# Altium schematic symbol library MISKO.SchLib: 32 symbols
Pins are listed as number, name and electrical type; pins without a type are passive.

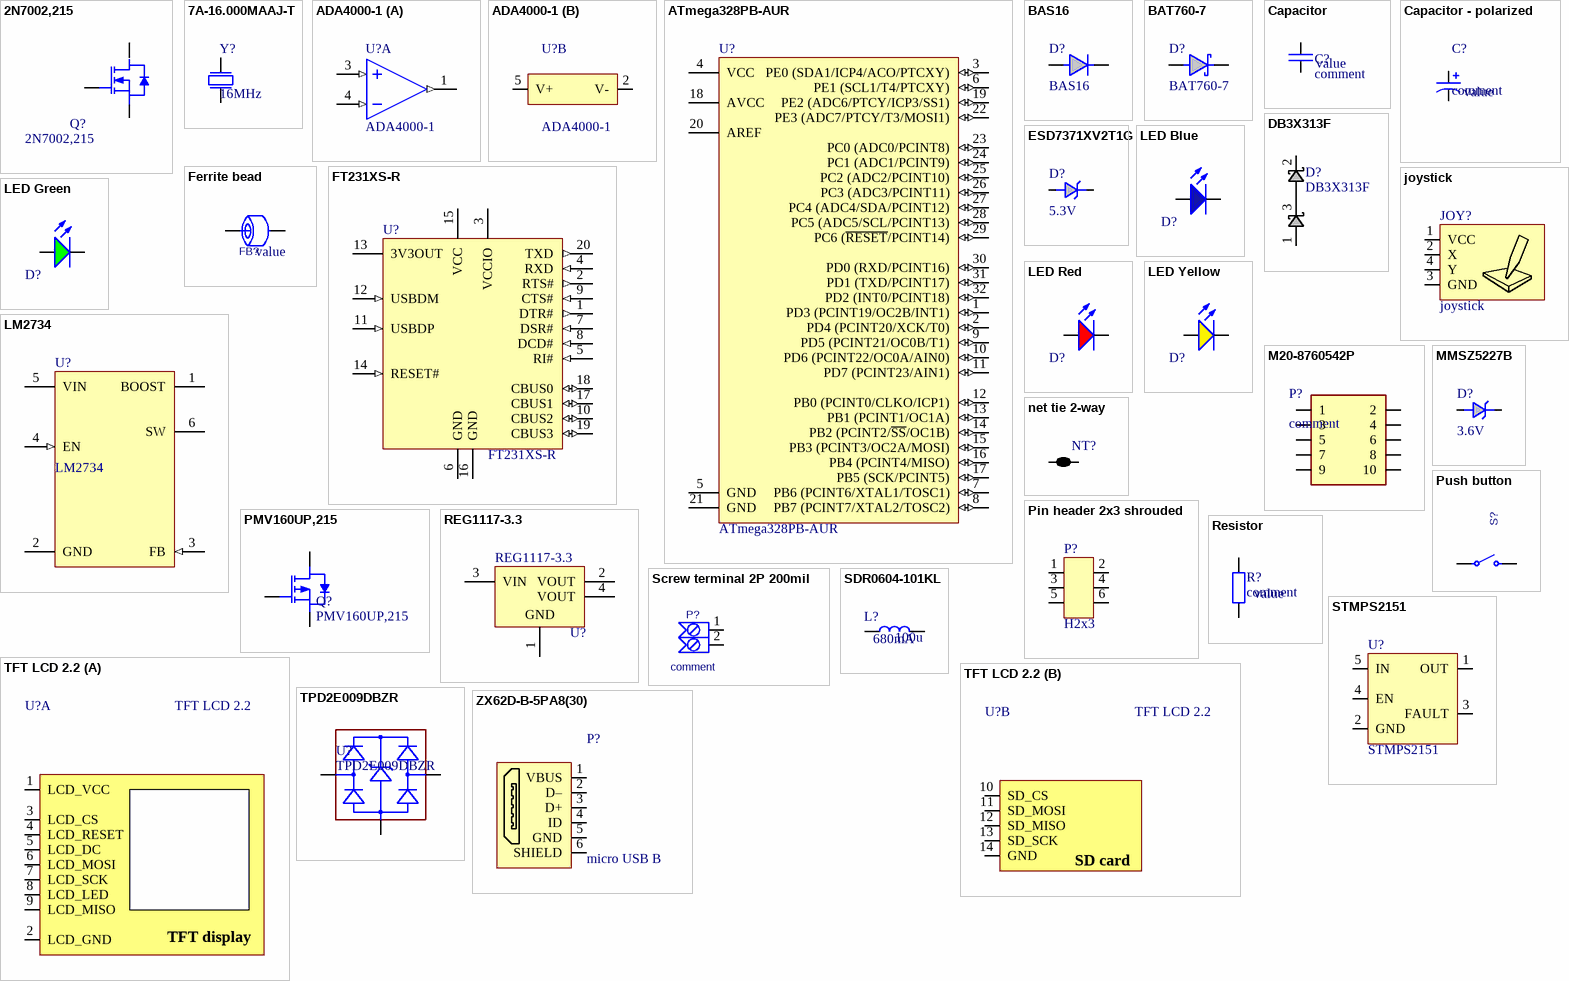
[diagram p0: symbols 2N7002,215 to ZX62D-B-5PA8(30)]

## 2N7002,215
designator Q?
N-Channel Trench MOSFET, 60 V, 0.3 A, 3-Pin SOT23, Tape and Reel; Manufacturer: NXP Semiconductors; Channel Type: N; Ciss [typ] (pF): 31; Coss [typ] (pF): 6.8; ID [max] (A): 0.3; Packing: Tape & Reel; Qr [typ] (nC): 30; VDS [max] (V): 60; VGSth [typ] (V): 2; DatasheetVersion: Rev. 7; PackageVersion: 06-03-16, 03/2006; PackageReference: SOT23; PackageDescription: 3-Pin Small Outline Transistor Package, Body 2.9 x 1.3 mm, Pitch 0.95 mm; Supplier 1: Digi-Key; Supplier Part Number 1: 568-1369-2-ND; Supplier 2: Digi-Key; Supplier Part Number 2: 568-1369-1-ND; Supplier 3: Digi-Key; Supplier Part Number 3: 568-1369-6-ND; Supplier 4: Farnell; Supplier Part Number 4: 2315576; Supplier 5: Farnell; Supplier Part Number 5: 1510761; Supplier 6: Farnell; Supplier Part Number 6: 1510761RL; Supplier 7: Newark; Supplier Part Number 7: 75R4879; Supplier 8: Newark; Supplier Part Number 8: 70R9742; Supplier 9: Mouser; Supplier Part Number 9: 771-2N7002-T/R; Mounting Technology: Surface Mount; Code_JEDEC: TO-236AB; PartNumber: 2N7002,215; ComponentLink1Description: Manufacturer URL; ComponentLink1URL: http://www.nxp.com/; ComponentLink2Description: Datasheet; ComponentLink2URL: http://www.nxp.com/documents/data_sheet/2N7002.pdf; ComponentLink3Description: Package Specification; ComponentLink3URL: http://www.nxp.com/documents/outline_drawing/sot023_po.pdf; HelpURL: https://www.farnell.com/datasheets/1499179.pdf
footprint SOT23-3 (Small Outline Transistor (SOT23), 0.96 mm pitch; 3 pin, 2.92 mm L X 1.30 mm W X 1.12 mm H body)
pins: 1 G "gate", 2 S "source", 3 D "drain"

## 7A-16.000MAAJ-T
designator Y?, comment 16MHz
Crystal, 16 MHz, SMD, 5mm x 3.2mm, 30 ppm, 18 pF, 30 ppm, 7A Series; Manufacturer: TCX; Manufacturer Number: 7A-16.000MAAJ-T; Dealer number: 1841946; Dealer: Farnell; Load capacitance: 18pF; Frequency tolerance: 30ppm; Category: Crystals; Price: 0.91; Value: 16MHz; Technology: SMT; Case: 5X3.2; HelpURL: https://www.farnell.com/datasheets/1041607.pdf
footprint TXC 7a QUARTZ CRYSTAL (TXC 7A series crysal oscillator footprint 5X3.2)
pins: 1, 2

## ADA4000-1
designator U?
Operational Amplifier, Single, 1 Amplifier, 5 MHz, 20 V/µs, ± 4V to ± 18V, TSOT, 5 Pins; Part Number: XOG0003; Manufacturer: Analog devices; Manufacturer Number: ADA4000-1AUJZ-R7; Dealer number: 2461002; Dealer: Farnell; Supply voltage max: +-18V; Devices: 1; Category: Integrated circuits; Price: 1.97; Case: SOT; Technology: SMT; HelpURL: https://www.farnell.com/datasheets/698265.pdf
footprint SOT23-5
part A pins: 1 OUT (out), 3 IN+ (in), 4 IN- (in)
part B pins: 2 V- (power), 5 V+ (power)

## ATmega328PB-AUR
designator U?
8-bit AVR Microcontroller, 32KB Flash, 1KB EEPROM, 2KB SRAM, 32-pin TQFP, Industrial Grade (-40°C to 85°C), Reel; HelpURL: http://ww1.microchip.com/downloads/en/DeviceDoc/40001907A.pdf; Manufacturer part number: ATmega328PB-AUR
footprint 32A_N (Thin QFP, 32-Leads, Body 7x7mm, Pitch 0.8mm, IPC Medium Density)
footprint 32A_L (Thin QFP, 32-Leads, Body 7x7mm, Pitch 0.8mm, IPC High Density)
footprint 32A_M (Thin QFP, 32-Leads, Body 7x7mm, Pitch 0.8mm, IPC Low Density)
pins: 1 PD3 (PCINT19/OC2B/INT1) (io), 2 PD4 (PCINT20/XCK/T0) (io), 3 PE0 (SDA1/ICP4/ACO/PTCXY) (io), 4 VCC (power), 5 GND (power), 6 PE1 (SCL1/T4/PTCXY) (io), 7 PB6 (PCINT6/XTAL1/TOSC1) (io), 8 PB7 (PCINT7/XTAL2/TOSC2) (io), 9 PD5 (PCINT21/OC0B/T1) (io), 10 PD6 (PCINT22/OC0A/AIN0) (io), 11 PD7 (PCINT23/AIN1) (io), 12 PB0 (PCINT0/CLKO/ICP1) (io), 13 PB1 (PCINT1/OC1A) (io), 14 PB2 (PCINT2/~{SS}/OC1B) (io), 15 PB3 (PCINT3/OC2A/MOSI) (io), 16 PB4 (PCINT4/MISO) (io), 17 PB5 (SCK/PCINT5) (io), 18 AVCC (power), 19 PE2 (ADC6/PTCY/ICP3/SS1) (io), 20 AREF, 21 GND (power), 22 PE3 (ADC7/PTCY/T3/MOSI1) (io), 23 PC0 (ADC0/PCINT8) (io), 24 PC1 (ADC1/PCINT9) (io), 25 PC2 (ADC2/PCINT10) (io), 26 PC3 (ADC3/PCINT11) (io), 27 PC4 (ADC4/SDA/PCINT12) (io), 28 PC5 (ADC5/SCL/PCINT13) (io), 29 PC6 (~{RESET}/PCINT14) (io), 30 PD0 (RXD/PCINT16) (io), 31 PD1 (TXD/PCINT17) (io), 32 PD2 (INT0/PCINT18) (io)

## BAS16
designator D?
Silicon Switching Diode for High-Speed Switching
footprint SOT23-3 (Small Outline Transistor (SOT23), 0.96 mm pitch; 3 pin, 2.92 mm L X 1.30 mm W X 1.12 mm H body); pin to pad A>1 C>3
pins: A, C

## BAT760-7
designator D?
Schottky Rectifier, 30 V, 1 A, Single, SOD-323, 2 Pins, 550 mV
footprint SOD-323
pins: A, C

## Capacitor
designator C?, comment comment
Generic capacitor; Value: value
footprint C_0603 (Chip Capacitor, 2-Leads, Body 1.57x0.85mm, IPC Medium Density)
footprint C_0805 (Chip Capacitor, 2-Leads, Body 2.05x1.25mm, IPC Medium Density)
footprint C_1206 (Chip Capacitor, 2-Leads, Body 3.20x1.60mm, IPC Medium Density)
footprint C_1210 (Chip Capacitor, 2-Leads, Body 3.20x2.50mm, IPC Medium Density)
pins: 1, 2

## Capacitor - polarized
designator C?, comment comment
Generic polarized capacitor; Value: value
footprint Tantalum Case A
pins: 1, 2

## DB3X313F
designator D?
Schottky Rectifier, 30 V, 130 mA, Dual Series, SOT-23, 3 Pins, 550 mV; HelpURL: https://www.farnell.com/datasheets/1912091.pdf; Manufacturer part number: DB3X313F
footprint SOT23-3 (Small Outline Transistor (SOT23), 0.96 mm pitch; 3 pin, 2.92 mm L X 1.30 mm W X 1.12 mm H body)
pins: 1 A, 2 C, 3 AC

## ESD7371XV2T1G
designator D?, comment 5.3V
ESD Protection Device, 20 V, SOD-523, 2 Pins, 5.3 V, 300 mW, ESD7371 Series; Manufacturer part number: ESD7371XV2T1G; HelpURL: https://www.farnell.com/datasheets/2907082.pdf
footprint SOD-523
pins: A, C

## Ferrite bead
designator FB?, comment comment  (value not drawn)
Generic ferrite bead; Value: value
footprint SMD_0402 (Chip; 1.00 mm L X 0.50 mm W X 0.40 mm H body)
footprint SMD_0603 (Chip 2-Leads, Body 1.57x0.85mm, IPC Medium Density)
footprint SMD_0805 (Chip 2-Leads, Body 2.05x1.25mm, IPC Medium Density)
footprint SMD_1206 (Chip 2-Leads, Body 3.15x1.60mm, IPC Medium Density)
pins: 1, 2

## FT231XS-R
designator U?
USB to Full-Handshake UART Interface Chip, UHCI/OHCI/EHCI Compatible, USB 2.0 Compatible, -40 to +85 degC, 20-Pin SSOP, Pb-Free, Tape and Reel; Manufacturer: FTDI; DatasheetVersion: ver 1.2, Feb-2013; PackageVersion: Feb-13; PackageReference: SSOP-20; PackageDescription: 20-Pin Small Outline Package, 8.6 x 3.9 mm Body, 0.635 mm Pitch; Code_JEDEC: MO-137-AD; PartNumber: FT231XS-R; ComponentLink1Description: Manufacturer URL; ComponentLink1URL: http://www.ftdichip.com/; ComponentLink2Description: Datasheet; ComponentLink2URL: http://www.ftdichip.com/Support/Documents/DataSheets/ICs/DS_FT231X.pdf; ComponentLink3Description: FT231X Product Page; ComponentLink3URL: www.ftdichip.com/Products/ICs/FT231X.html; HelpURL: https://www.farnell.com/datasheets/1913754.pdf
footprint SSOP-20
pins: 1 DTR# (out) "Data Terminal Ready Control Output / Handshake Signal.", 2 RTS# (out) "Request to Send Control Output / Handshake Signal.", 3 VCCIO (power) "1V8 -3V3 supply for the IO cells.", 4 RXD (in) "Receiving Asynchronous Data Input.", 5 RI# (in) "Ring Indicator input for remote wake up.", 6 GND (power) "0V Ground input.", 7 DSR# (in) "Data Set Ready Control Input / Handshake Signal.", 8 DCD# (in) "Data Carrier Detect Control Input.", 9 CTS# (in) "Clear To Send Control Input / Handshake Signal.", 10 CBUS2 (io) "Configurable CBUS I/O Pin. Function of this pin is configured in the device MTP memory. The default configuration is TXLED#.", 11 USBDP (in) "USB Data Signal Plus.", 12 USBDM (in) "USB Data Signal Minus.", 13 3V3OUT (power) "3V3 output at 50mA. May be used to power VCCIO. When VCC is 3V3, pin 13 is an input pin.", 14 RESET# (in) "Reset input (active low).", 15 VCC (power) "5 V (or 3V3) supply to IC.", 16 GND (power) "0V Ground input.", 17 CBUS1 (io) "Configurable CBUS I/O Pin. Function of this pin is configured in the device MTP memory. The default configuration is RXLED#.", 18 CBUS0 (io) "Configurable CBUS I/O Pin. Function of this pin is configured in the device MTP memory. The default configuration is TXDEN.", 19 CBUS3 (io) "Configurable CBUS I/O Pin. Function of this pin is configured in the device MTP memory. The default configuration is SLEEP#.", 20 TXD (out) "Transmit Asynchronous Data Output."

## joystick
designator JOY?
Analog joystick
footprint PSP1000JOY (PSP 1000 Joystick, Pitch 2.00mm, IPC Low Density)
pins: 1 VCC, 2 X, 3 GND, 4 Y

## LED Blue
designator D?, comment comment  (value not drawn)
Generic LED Blue
footprint LED_0603 (SMD LED, 2-Leads, Body 1.57x0.85mm, IPC Medium Density)
footprint LED_0805 (SMD LED, 2-Leads, Body 2.05x1.25mm, IPC Medium Density)
footprint LED_1206 (SMD LED, 2-Leads, Body 3.15x1.60mm, IPC Medium Density)
pins: 1 -, 2 +

## LED Green
designator D?  (value not drawn)
Generic LED Green
footprint LED_0603 (SMD LED, 2-Leads, Body 1.57x0.85mm, IPC Medium Density)
footprint LED_0805 (SMD LED, 2-Leads, Body 2.05x1.25mm, IPC Medium Density)
footprint LED_1206 (SMD LED, 2-Leads, Body 3.15x1.60mm, IPC Medium Density)
pins: 1 -, 2 +

## LED Red
designator D?  (value not drawn)
Generic LED Red
footprint LED_0603 (SMD LED, 2-Leads, Body 1.57x0.85mm, IPC Medium Density)
footprint LED_0805 (SMD LED, 2-Leads, Body 2.05x1.25mm, IPC Medium Density)
footprint LED_1206 (SMD LED, 2-Leads, Body 3.15x1.60mm, IPC Medium Density)
pins: 1 -, 2 +

## LED Yellow
designator D?  (value not drawn)
Generic LED Yellow
footprint LED_0603 (SMD LED, 2-Leads, Body 1.57x0.85mm, IPC Medium Density)
footprint LED_0805 (SMD LED, 2-Leads, Body 2.05x1.25mm, IPC Medium Density)
footprint LED_1206 (SMD LED, 2-Leads, Body 3.15x1.60mm, IPC Medium Density)
pins: 1 -, 2 +

## LM2734
designator U?
Thin SOT23 1A Load Step-Down DC-DC Regulator; PartNumber: LM2734XMK; Manufacturer: National Semiconductor; CompType: Switcher; PackageTopMarking: SFDB*XTT; PowerWise: N; FirstPublished: 4-Dec-2008; DatasheetVersion: Jun-2008; PackageVersion: revD, Jul-2005; PackageReference: MK06A; Publisher: Altium Limited; PackageDescription: Molded TSOT, 2.97 x 1.65 x 0.87mm Body, 6 Lead, 0.95mm Pitch; RoHS: Y; PinCount: 6; DigiKeyPartNumber: LM2734XMKCT-ND; Code_JEDEC: MO-193-AA; Code_IPC: SOT26A-6; ComponentLink1Description: LM2734 Datasheet; ComponentLink1URL: http://www.national.com/ds/LM/LM2734.pdf; ComponentLink2Description: LM2734 Web Page; ComponentLink2URL: http://www.national.com/pf/LM/LM2734.html; ComponentLink3Description: MK06A Package Page; ComponentLink3URL: http://www.national.com/packaging/folders/mk06a.html; Supplier 1: Farnell; Supplier 2: Farnell; HelpURL: https://www.ti.com/lit/ds/symlink/lm2734.pdf
footprint SOT-23-6-THIN (6-  pin Thin SOT package)
pins: 1 BOOST, 2 GND (power), 3 FB (in), 4 EN (in), 5 VIN (power), 6 SW (power)

## M20-8760542P
designator P?, comment comment
Pin Header, Vertical, Wire-to-Board, 2.54 mm, 2 Rows, 10 Contacts, Surface Mount Straight, M20-87; Manufacturer_Name: Harwin; Manufacturer_Part_Number: M20-8760542P; Datasheet Link: https://cdn.harwin.com/pdfs/M20-876P.pdf; Mouser Part Number: 855-M20-8760542P; Mouser Price/Stock: https://www.mouser.co.uk/ProductDetail/Harwin/M20-8760542P?qs=vF78I%252BjhbY%252B9gKdT9lbnBA%3D%3D
footprint HEADER SMD 2X5 100 MILS
pins: 1, 2, 3, 4, 5, 6, 7, 8, 9, 10

## MMSZ5227B
designator D?, comment 3.6V
Zener Single Diode, 3.6 V, 500 mW, SOD-123, 5 %, 2 Pins, 150 °C; Manufacturer part number: MMSZ5227B; HelpURL: https://www.farnell.com/datasheets/1670964.pdf
footprint SOD-123_N (Diode, Small Outline Diode (SOD); 2.675 mm L X 1.60 mm W X 1.30 mm H body)
pins: A, C

## net tie 2-way
designator NT?  (net tie, no BOM)
A net tie connecting two different  nets.
footprint NET TIE 2-way (2-way net tie junction)
pins: 1, 2

## Pin header 2x3 shrouded
designator P?, comment H2x3
Generic shrouded pin header, 2x3, male
footprint HEADER 2X3 SHROUDED
pins: 1, 2, 3, 4, 5, 6
1 alternate drawing of the same symbol

## PMV160UP,215
designator Q?
P-Channel Trench MOSFET, -20 V, -1.2 A, -55 to 150 degC, 3-Pin SOT23, Tape and Reel; Manufacturer: NXP Semiconductors; Channel Type: P; Ciss [typ] (pF): 365; Coss [typ] (pF): 42; Packing: Tape & Reel; VGSth [typ] (V): -0.7; DatasheetVersion: Rev. 2; PackageVersion: 06-03-16, 03/2006; PackageReference: SOT23; PackageDescription: 3-Pin Small Outline Transistor Package, Body 2.9 x 1.3 mm, Pitch 0.95 mm; Supplier 1: Digi-Key; Supplier Part Number 1: 568-10320-2-ND; Supplier 2: Digi-Key; Supplier Part Number 2: 568-10320-1-ND; Supplier 3: Digi-Key; Supplier Part Number 3: 568-10320-6-ND; Supplier 4: Newark; Supplier Part Number 4: 54T9404; Supplier 5: Mouser; Supplier Part Number 5: 771-PMV160UP215; ID [max] (A): -1.2; VDS [max] (V): -20; Mounting Technology: Surface Mount; Code_JEDEC: TO-236AB; PartNumber: PMV160UP,215; ComponentLink1Description: Manufacturer URL; ComponentLink1URL: http://www.nxp.com/; ComponentLink2Description: Datasheet; ComponentLink2URL: http://www.nxp.com/documents/data_sheet/PMV160UP.pdf; ComponentLink3Description: Package Specification; ComponentLink3URL: http://www.nxp.com/documents/outline_drawing/sot023_po.pdf; HelpURL: https://eu.mouser.com/datasheet/2/916/PMV160UP-1600107.pdf
footprint SOT23-3 (Small Outline Transistor (SOT23), 0.96 mm pitch; 3 pin, 2.92 mm L X 1.30 mm W X 1.12 mm H body)
pins: 1 G "gate", 2 S "source", 3 D "drain"

## Push button
designator S?
Generic push button
footprint PUSH BUTTON 6x6 mm
pins: 1, 2
1 alternate drawing of the same symbol

## REG1117-3.3
designator U?
Single Output LDO, 800 mA, Fixed 3.3 V Output, 3.8 to 15 V Input, with Internal Current Limiting, 4-pin SOT-223 (DCY), -40 to 125 degC, Green (RoHS & no Sb/Br); Manufacturer: Texas Instruments; Fixed Output Options(V): 5; Iout(Max)(A): 0.8; Iq(Typ)(mA): 4; Rating: Catalog; SubFamily: Single Channel LDO; Vdo(Typ)(mV): 1100; Vin(Max)(V): 15; Vin(Min)(V): 3.8; Vout Adj(Max)(V): 3.3; DatasheetVersion: SBVS001D; PackageVersion: 4202506/B; PackageReference: DCY4; PackageDescription: 4-Pin Plastic Small Outline, Body 3.5 x 6.5 mm, Pitch 2.3 mm; Supplier 1: Digi-Key; Supplier Part Number 1: REG1117-3.3-ND; Supplier 2: Farnell; Supplier Part Number 2: 1212355; Supplier 3: Farnell; Supplier Part Number 3: 2126471; Supplier 4: Newark; Supplier Part Number 4: 35C1963; Supplier 5: Mouser; Supplier Part Number 5: 595-REG1117-3.3; Eco-Plan: Green (RoHS & no Sb/Br); Vout Adj(Min)(V): 3.3; Mounting Technology: Surface Mount; Code_JEDEC: TO-261; PartNumber: REG1117-3.3; ComponentLink1Description: Manufacturer URL; ComponentLink1URL: http://www.ti.com/; ComponentLink2Description: Datasheet; ComponentLink2URL: http://www.ti.com/general/docs/lit/getliterature.tsp?genericPartNumber=REG1117-33&fileType=pdf; ComponentLink3Description: Package Specification; ComponentLink3URL: http://www.ti.com/litv/pdf/mpds094a; HelpURL: http://www.ti.com/general/docs/suppproductinfo.tsp?distId=26&gotoUrl=http%3A%2F%2Fwww.ti.com%2Flit%2Fgpn%2FREG1117
footprint SOT-223-4
pins: 1 GND (power), 2 VOUT (power), 3 VIN (power), 4 VOUT (power)

## Resistor
designator R?, comment comment
Generic resistor; Value: value
footprint R_0402 (Resistor, Chip; 1.00 mm L X 0.50 mm W X 0.40 mm H body)
footprint R_0603 (Chip Resistor, 2-Leads, Body 1.57x0.85mm, IPC Medium Density)
footprint R_0805 (Chip Resistor, 2-Leads, Body 2.05x1.25mm, IPC Medium Density)
footprint R_1206 (Chip Resistor, 2-Leads, Body 3.15x1.60mm, IPC Medium Density)
pins: 1, 2

## Screw terminal 2P 200mil
designator P?, comment comment
Generic screw terminal, 2 poles, 200 mil pitch; Value: *
footprint VRSTNA SPONKA 2P/16A
pins: 1, 2

## SDR0604-101KL
designator L?, comment 680mA  value 100u
Power Inductor (SMD), 100 µH, 520 mA, Unshielded, 680 mA, SDR0604
footprint IND_6060_N (Inductor, Chip; 6.00 mm L X 6.00 mm W X 2.80 mm H body)
pins: 1, 2

## STMPS2151
designator U?
Power Load Switch, Single High Side, Active High, 1 Output, 5V, 0.5A, SOT-23-5; Supplier Part Number 1: 1842616; Supplier 1: Farnell; HelpURL: https://www.farnell.com/datasheets/1700527.pdf; Manufacturer part number: STMPS2151
footprint SOT23-5
pins: 1 OUT, 2 GND, 3 FAULT, 4 EN, 5 IN

## TFT LCD 2.2
designator U?
LCD 320x240, 65536 color, ILI3941
footprint LCD tft 2.2
part A pins: 1 LCD_VCC, 2 LCD_GND, 3 LCD_CS, 4 LCD_RESET, 5 LCD_DC, 6 LCD_MOSI, 7 LCD_SCK, 8 LCD_LED, 9 LCD_MISO
part B pins: 10 SD_CS, 11 SD_MOSI, 12 SD_MISO, 13 SD_SCK, 14 GND
part A text: TFT display
part B text: SD card

## TPD2E009DBZR
designator U?
ESD protection for high-speed interfaces; Manufacturer: Texas Instruments; Dealer number: 595-TPD2E009DBZR; Dealer: Mouser; Category: diode array; Price: 0.174; Manufacturer Number: TPD2E009DBZR; Technology: SMT; HelpURL: http://www.ti.com/general/docs/suppproductinfo.tsp?distId=26&gotoUrl=http%3A%2F%2Fwww.ti.com%2Flit%2Fgpn%2Ftpd2e009
footprint SOT23-3 (Small Outline Transistor (SOT23), 0.96 mm pitch; 3 pin, 2.92 mm L X 1.30 mm W X 1.12 mm H body)
pins: 1 D+, 2 D-, 3 GND

## ZX62D-B-5PA8(30)
designator P?, comment micro USB B
USB Connector, Micro USB Type B, USB 2.0, Receptacle, 5 Ways, Surface Mount, Through Hole Mount; Manufacturer: Hirose; Manufacturer part number: ZX62D-B-5PA8(30); Supplier 1: Farnell; ComponentLink1URL: http://www.farnell.com/datasheets/1693470.pdf; ComponentLink1Description: http://www.farnell.com/datasheets/1693470.pdf; Supplier Part Number 1: 2300438; HelpURL: https://www.farnell.com/datasheets/2691174.pdf
footprint micro-USB-HRS-ZX62D-B-5PA8; pin to pad 6>0
pins: 1 VBUS, 2 D–, 3 D+, 4 ID, 5 GND, 6 SHIELD